# Altium footprint library ACB_PcbLib.PcbLib: 152 footprints (part 7 of 10)
Each footprint in its own frame and in the unit in brackets; x right, y up, seen from the top. Pads: shape width x height; smd on the part's side, far side on the other; paste and mask are expansions set on the pad; w line width, h text height; cw(c..) or ccw(c..) is an arc to the next point about the centre after c.
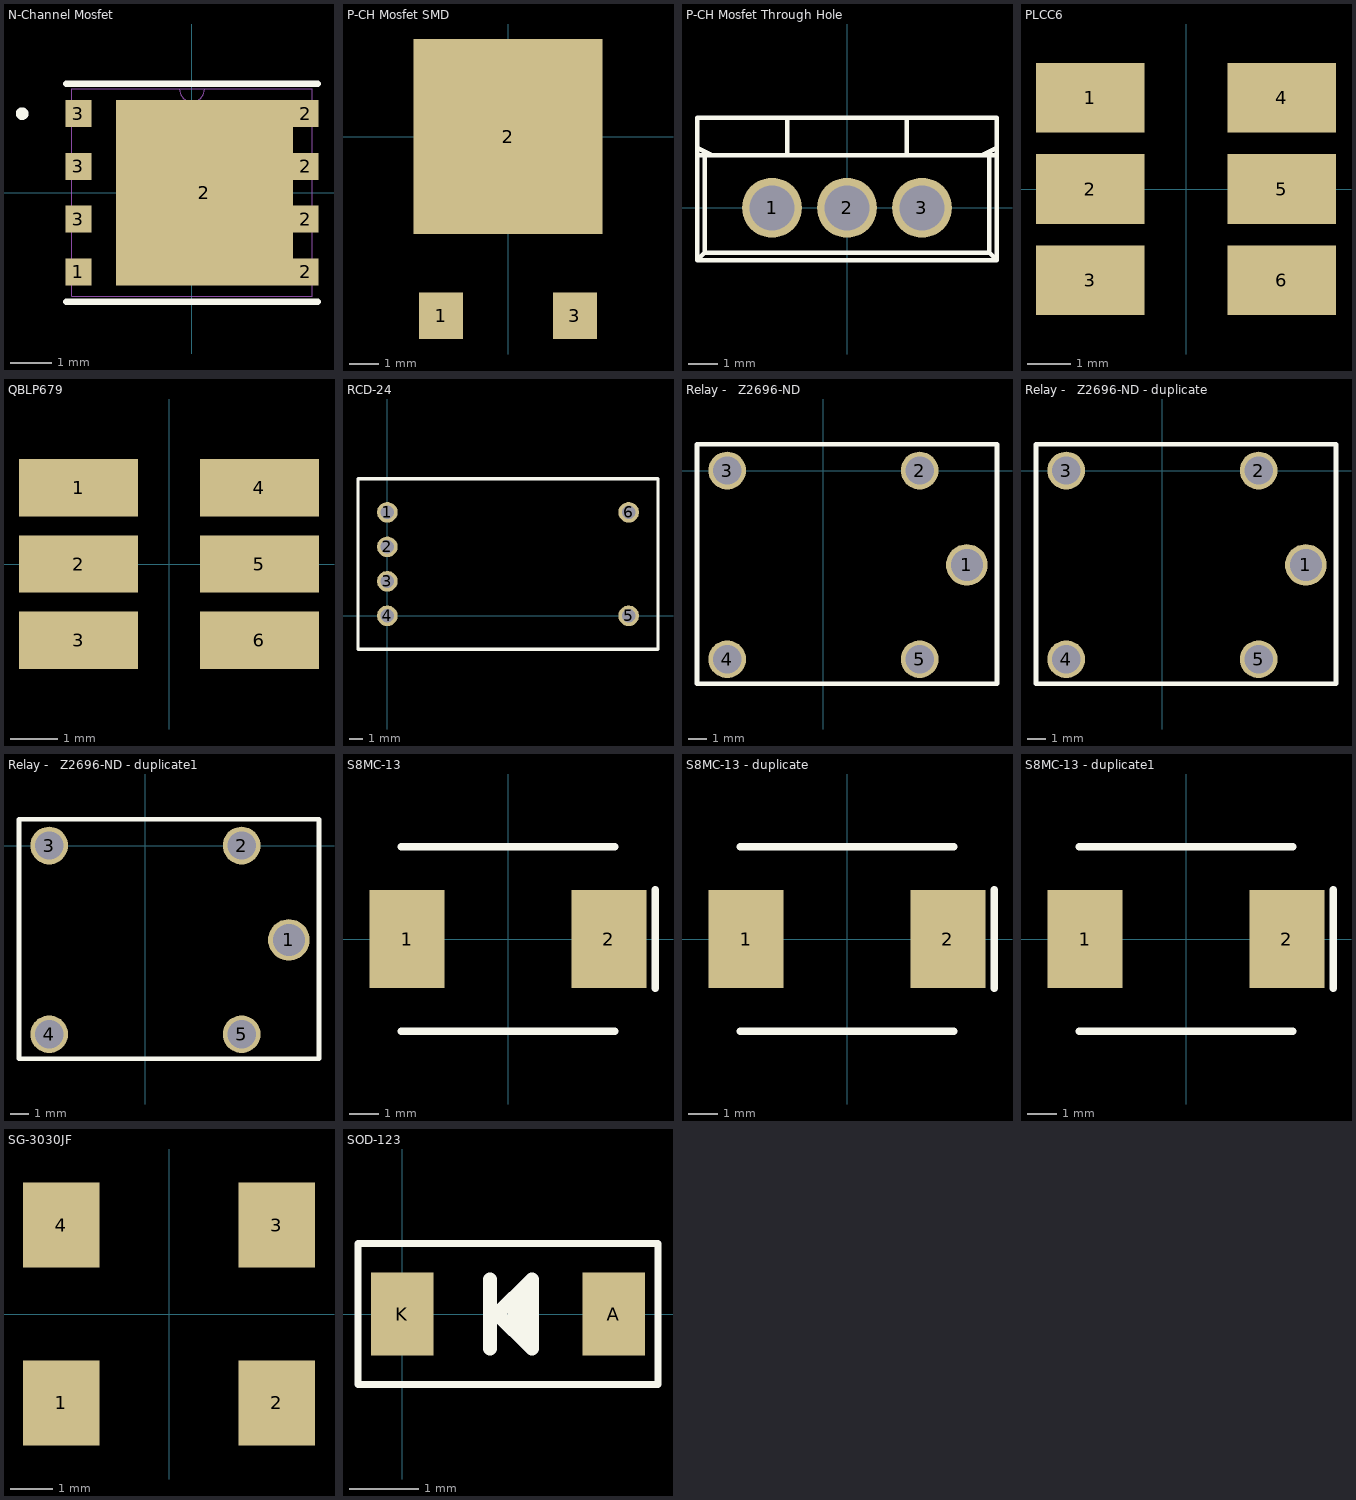
[diagram p6: the footprints below, top view; thin cyan lines are the x and y axes]

## N-Channel Mosfet [mm]
pads (9):
  rect 0.63x0.65 smd: 1(-2.735,-1.905) 2(2.735,-1.905) 2(2.735,-0.635) 2(2.735,0.635) 2(2.735,1.905) 3(-2.735,-0.635) 3(-2.735,0.635) 3(-2.735,1.905)
  rect 4.27x4.46 smd: 2(0.3,0)
Top Overlay:
  circle w0.152: c-4.091,1.905 r0.076
  lines w0.152: -3.027,-2.627 3.027,-2.627 ; -3.027,2.627 3.027,2.627
Mechanical 1:
  circle w0.025: c-2.725,1.905 r0.076
  lines w0.025: -0.305,2.5 ccw(c0,2.5) 0.305,2.5 ; -2.9,-2.5 -2.9,2.5 2.9,2.5 2.9,-2.5 -2.9,-2.5
3D body: height 1, standoff 0, extent -2.54,-2.537 2.54,2.537

## P-CH Mosfet SMD [mm]
pads (3):
  rect 1.5x1.6 smd: 1(-2.3,-6.15) 3(2.3,-6.15)
  rect 6.5x6.7 smd: 2(0,0)
3D body: height 0.5, standoff 0, extent 1.95,-6.044 2.65,-4.256
3D body: height 0.5, standoff 0, extent -2.65,-6.069 -1.95,-4.281
3D body: height 1.5, standoff 0, extent -3.25,-4.25 3.25,3

## P-CH Mosfet Through Hole [mil]
pads (3):
  round 80 hole 60: 1(-100,0) 2(0,0) 3(100,0)
Top Overlay:
  lines w6: -200,70 -180,70 ; -200,80 -180,70 ; -190,70 -190,-60 ; -80,120 -80,70 0,70 ; 80,120 80,70 0,70 ; 190,70 190,-60 ; 200,70 180,70 ; 200,80 180,70 ; -200,-70 -190,-60 ; -200,-70 -200,120 0,120 200,120 200,-70 ; -200,-70 0,-70 200,-70 ; -190,-60 0,-60 190,-60 ; -180,70 0,70 ; 0,70 180,70 ; 190,-60 200,-70
3D body: height 920, standoff 320, extent -200,70 200,120
3D body: height 670, standoff 320, extent -200,-70 200,70
3D body: height 160, standoff -120, extent 80,-20 120,20
3D body: height 320, standoff 160, extent 65,-20 135,20
3D body: height 320, standoff 160, extent -35,-20 35,20
3D body: height 160, standoff -120, extent -20,-20 20,20
3D body: height 320, standoff 160, extent -135,-20 -65,20
3D body: height 160, standoff -120, extent -120,-20 -80,20

## PCBComponent_1 - duplicate [mm]

## PLCC6 [mm]
pads (6):
  rect 2.5x1.6 smd: 1(-2.2,2.1) 2(-2.2,0) 3(-2.2,-2.1) 4(2.2,2.1) 5(2.2,0) 6(2.2,-2.1)
3D body: height 2.5, standoff 0, extent -2.1,-2.8 2.2,2.8

## QBLP679 [mm]
pads (6):
  rect 2.5x1.2 smd: 1(-1.9,1.6) 2(-1.9,0) 3(-1.9,-1.6) 4(1.9,1.6) 5(1.9,0) 6(1.9,-1.6)
3D body: height 1.6, standoff 0, extent -2.095,-2.286 2.095,2.286

## RCD-24 [mil]
pads (6):
  round 60 hole 39.37: 1(0,300) 2(0,200) 3(0,100) 4(0,0) 5(700,0) 6(700,300)
Top Overlay:
  lines w10: -85.04,-96.85 785.04,-96.85 785.04,397.24 -85.04,397.24 -85.04,-96.85
  text "." at -55,425 h60
3D body: height 334.65, standoff 0, extent -85,-95 785,400

## Relay -   Z2696-ND [mm]
pads (5):
  round 2.2 hole 1.7: 1(7.6,-5)
  round 2 hole 1.5: 2(5.1,0) 3(-5.1,0) 4(-5.1,-10) 5(5.1,-10)
Top Overlay:
  lines w0.254: -6.7,-11.303 9.2,-11.303 9.2,1.397 -6.7,1.397 -6.7,-11.303

## Relay -   Z2696-ND - duplicate [mm]
pads (5):
  round 2.2 hole 1.7: 1(7.6,-5)
  round 2 hole 1.5: 2(5.1,0) 3(-5.1,0) 4(-5.1,-10) 5(5.1,-10)
Top Overlay:
  lines w0.254: -6.7,-11.303 -6.7,1.397 9.2,1.397 9.2,-11.303 -6.7,-11.303

## Relay -   Z2696-ND - duplicate1 [mm]
pads (5):
  round 2.2 hole 1.7: 1(7.6,-5)
  round 2 hole 1.5: 2(5.1,0) 3(-5.1,0) 4(-5.1,-10) 5(5.1,-10)
Top Overlay:
  lines w0.254: -6.7,-11.303 -6.7,1.397 9.2,1.397 9.2,-11.303 -6.7,-11.303

## Relay DPDT [mm]

## S8MC-13 [mm]
pads (2):
  rect 2.54x3.302 smd: 1(-3.4,0) 2(3.4,0)
Top Overlay:
  lines w0.254: -3.6,-3.1 3.6,-3.1 ; -3.6,3.1 3.6,3.1 ; 4.953,-1.651 4.953,1.651

## S8MC-13 - duplicate [mm]
pads (2):
  rect 2.54x3.302 smd: 1(-3.4,0) 2(3.4,0)
Top Overlay:
  lines w0.254: -3.6,-3.1 3.6,-3.1 ; -3.6,3.1 3.6,3.1 ; 4.953,-1.651 4.953,1.651

## S8MC-13 - duplicate1 [mm]
pads (2):
  rect 2.54x3.302 smd: 1(-3.4,0) 2(3.4,0)
Top Overlay:
  lines w0.254: -3.6,-3.1 3.6,-3.1 ; -3.6,3.1 3.6,3.1 ; 4.953,-1.651 4.953,1.651

## SG-3030JF [mm]
pads (4):
  rect 1.8x2 smd: 1(-2.54,-2.1) 2(2.54,-2.1) 3(2.54,2.1) 4(-2.54,2.1)
3D body: height 1.5, standoff 0, extent -3.6,-2.3 3.6,2.3

## SOD-123 [mm]
pads (2):
  rect 0.9x1.2 smd: A(3.048,0) K(0,0)
Top Overlay:
  lines w0.102: -0.635,-1.016 3.683,-1.016 3.683,1.016 -0.635,1.016 -0.635,-1.016
  lines w0.2: 1.267,-0.5 1.267,0.5 ; 1.617,-0.15 1.617,0.15 ; 1.767,-0.3 1.767,0.3 ; 1.367,0 1.867,0.5 1.867,-0.5 1.367,0
3D body: height 0.79, standoff 0.74, extent 0.475,-0.75 0.6,0.75
3D body: height 0.7, standoff 0, extent 0.013,-0.25 0.138,0.25
3D body: height 0.7, standoff 0.5, extent 0.125,-0.25 0.225,0.25
3D body: height 0.2, standoff 0, extent -0.175,-0.25 0.025,0.25
3D body: height 0.76, standoff 0, extent 0.225,-0.875 2.9,0.875
3D body: height 0.2, standoff 0, extent 3.1,-0.225 3.3,0.275
3D body: height 0.7, standoff 0.5, extent 2.9,-0.225 3,0.275
3D body: height 0.7, standoff 0, extent 2.987,-0.225 3.112,0.275